# Altium schematic symbol library STM32MP157FAB1.SchLib: 1 symbol
Pins are listed as number, name and electrical type; pins without a type are passive.

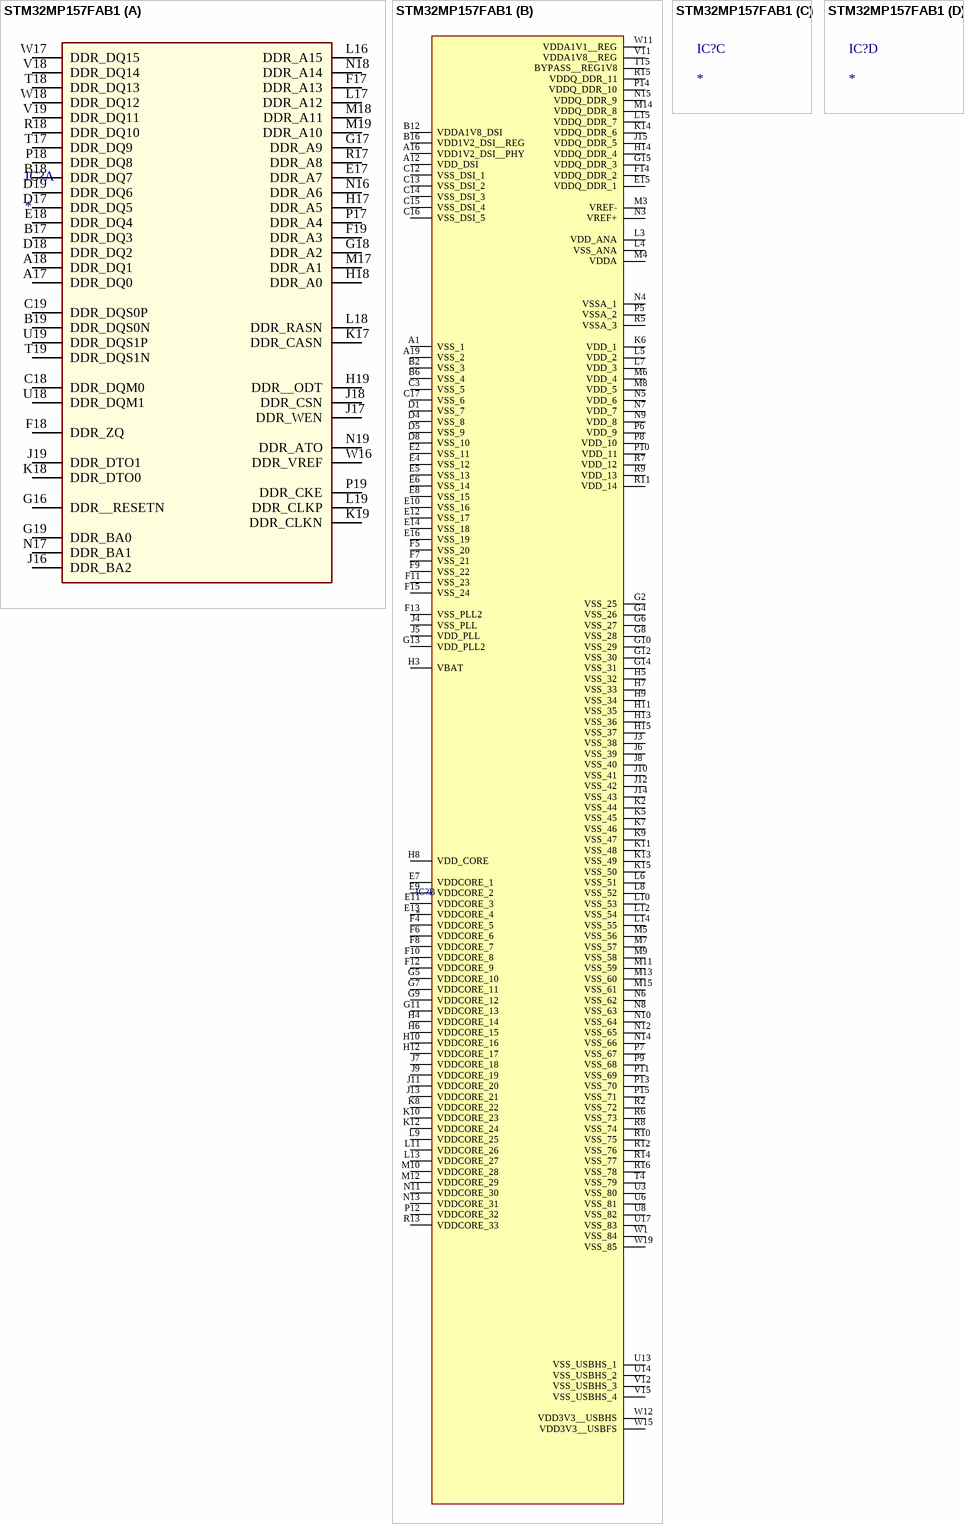
[diagram p0: symbol STM32MP157FAB1]

## STM32MP157FAB1
designator IC?
Integrated Circuit; Manufacturer_Name: STMicroelectronics; Manufacturer_Part_Number: STM32MP157FAB1; Datasheet Link: https://www.st.com/resource/en/datasheet/stm32mp157f.pdf; Height: 1.29mm; Mouser Part Number: 511-STM32MP157FAB1; Mouser Price/Stock: https://www.mouser.co.uk/ProductDetail/STMicroelectronics/STM32MP157FAB1?qs=xZ%2FP%252Ba9zWqaMNhk4KMq8KA%3D%3D; Arrow Part Number: STM32MP157FAB1; Arrow Price/Stock: https://www.arrow.com/en/products/stm32mp157fab1/stmicroelectronics?region=nac
footprint BGA354C80P19X19_1600X1600X129
part A pins: A17 DDR_DQ0, A18 DDR_DQ1, B17 DDR_DQ3, B18 DDR_DQ7, B19 DDR_DQS0N, C18 DDR_DQM0, C19 DDR_DQS0P, D17 DDR_DQ5, D18 DDR_DQ2, D19 DDR_DQ6, E17 DDR_A7, E18 DDR_DQ4, F17 DDR_A13, F18 DDR_ZQ, F19 DDR_A3, G16 DDR__RESETN, G17 DDR_A9, G18 DDR_A2, G19 DDR_BA0, H17 DDR_A5, H18 DDR_A0, H19 DDR__ODT, J16 DDR_BA2, J17 DDR_WEN, J18 DDR_CSN, J19 DDR_DTO1, K17 DDR_CASN, K18 DDR_DTO0, K19 DDR_CLKN, L16 DDR_A15, L17 DDR_A12, L18 DDR_RASN, L19 DDR_CLKP, M17 DDR_A1, M18 DDR_A11, M19 DDR_A10, N16 DDR_A6, N17 DDR_BA1, N18 DDR_A14, N19 DDR_ATO, P17 DDR_A4, P18 DDR_DQ8, P19 DDR_CKE, R17 DDR_A8, R18 DDR_DQ10, T17 DDR_DQ9, T18 DDR_DQ13, T19 DDR_DQS1N, U18 DDR_DQM1, U19 DDR_DQS1P, V18 DDR_DQ14, V19 DDR_DQ11, W16 DDR_VREF, W17 DDR_DQ15, W18 DDR_DQ12
part B pins: A1 VSS_1, A12 VDD_DSI, A16 VDD1V2_DSI__PHY, A19 VSS_2, B2 VSS_3, B6 VSS_4, B12 VDDA1V8_DSI, B16 VDD1V2_DSI__REG, C3 VSS_5, C12 VSS_DSI_1, C13 VSS_DSI_2, C14 VSS_DSI_3, C15 VSS_DSI_4, C16 VSS_DSI_5, C17 VSS_6, D1 VSS_7, D4 VSS_8, D5 VSS_9, D8 VSS_10, E2 VSS_11, E4 VSS_12, E5 VSS_13, E6 VSS_14, E7 VDDCORE_1, E8 VSS_15, E9 VDDCORE_2, E10 VSS_16, E11 VDDCORE_3, E12 VSS_17, E13 VDDCORE_4, E14 VSS_18, E15 VDDQ_DDR_1, E16 VSS_19, F4 VDDCORE_5, F5 VSS_20, F6 VDDCORE_6, F7 VSS_21, F8 VDDCORE_7, F9 VSS_22, F10 VDDCORE_8, F11 VSS_23, F12 VDDCORE_9, F13 VSS_PLL2, F14 VDDQ_DDR_2, F15 VSS_24, G2 VSS_25, G4 VSS_26, G5 VDDCORE_10, G6 VSS_27, G7 VDDCORE_11, G8 VSS_28, G9 VDDCORE_12, G10 VSS_29, G11 VDDCORE_13, G12 VSS_30, G13 VDD_PLL2, G14 VSS_31, G15 VDDQ_DDR_3, H3 VBAT, H4 VDDCORE_14, H5 VSS_32, H6 VDDCORE_15, H7 VSS_33, H8 VDD_CORE, H9 VSS_34, H10 VDDCORE_16, H11 VSS_35, H12 VDDCORE_17, H13 VSS_36, H14 VDDQ_DDR_4, H15 VSS_37, J3 VSS_38, J4 VSS_PLL, J5 VDD_PLL, J6 VSS_39, J7 VDDCORE_18, J8 VSS_40, J9 VDDCORE_19, J10 VSS_41, J11 VDDCORE_20, J12 VSS_42, J13 VDDCORE_21, J14 VSS_43, J15 VDDQ_DDR_5, K2 VSS_44, K5 VSS_45, K6 VDD_1, K7 VSS_46, K8 VDDCORE_22, K9 VSS_47, K10 VDDCORE_23, K11 VSS_48, K12 VDDCORE_24, K13 VSS_49, K14 VDDQ_DDR_6, K15 VSS_50, L3 VDD_ANA, L4 VSS_ANA, L5 VDD_2, L6 VSS_51, L7 VDD_3, L8 VSS_52, L9 VDDCORE_25, L10 VSS_53, L11 VDDCORE_26, L12 VSS_54, L13 VDDCORE_27, L14 VSS_55, L15 VDDQ_DDR_7, M3 VREF-, M4 VDDA, M5 VSS_56, M6 VDD_4, M7 VSS_57, M8 VDD_5, M9 VSS_58, M10 VDDCORE_28, M11 VSS_59, M12 VDDCORE_29, M13 VSS_60, M14 VDDQ_DDR_8, M15 VSS_61, N3 VREF+, N4 VSSA_1, N5 VDD_6, N6 VSS_62, N7 VDD_7, N8 VSS_63, N9 VDD_8, N10 VSS_64, N11 VDDCORE_30, N12 VSS_65, N13 VDDCORE_31, N14 VSS_66, N15 VDDQ_DDR_9, P5 VSSA_2, P6 VDD_9, P7 VSS_67, P8 VDD_10, P9 VSS_68, P10 VDD_11, P11 VSS_69, P12 VDDCORE_32, P13 VSS_70, P14 VDDQ_DDR_10, P15 VSS_71, R2 VSS_72, R5 VSSA_3, R6 VSS_73, R7 VDD_12, R8 VSS_74, R9 VDD_13, R10 VSS_75, R11 VDD_14, R12 VSS_76, R13 VDDCORE_33, R14 VSS_77, R15 VDDQ_DDR_11, R16 VSS_78, T4 VSS_79, T15 BYPASS__REG1V8, U3 VSS_80, U6 VSS_81, U8 VSS_82, U13 VSS_USBHS_1, U14 VSS_USBHS_2, U17 VSS_83, V11 VDDA1V8__REG, V12 VSS_USBHS_3, V15 VSS_USBHS_4, W1 VSS_84, W11 VDDA1V1__REG, W12 VDD3V3__USBHS, W15 VDD3V3__USBFS, W19 VSS_85